# Altium footprint library IC_SMD_QUAD.PcbLib: 112 footprints (part 3 of 7)
Each footprint in its own frame and in the unit in brackets; x right, y up, seen from the top. Pads: shape width x height; smd on the part's side, far side on the other; paste and mask are expansions set on the pad; w line width, h text height; cw(c..) or ccw(c..) is an arc to the next point about the centre after c.
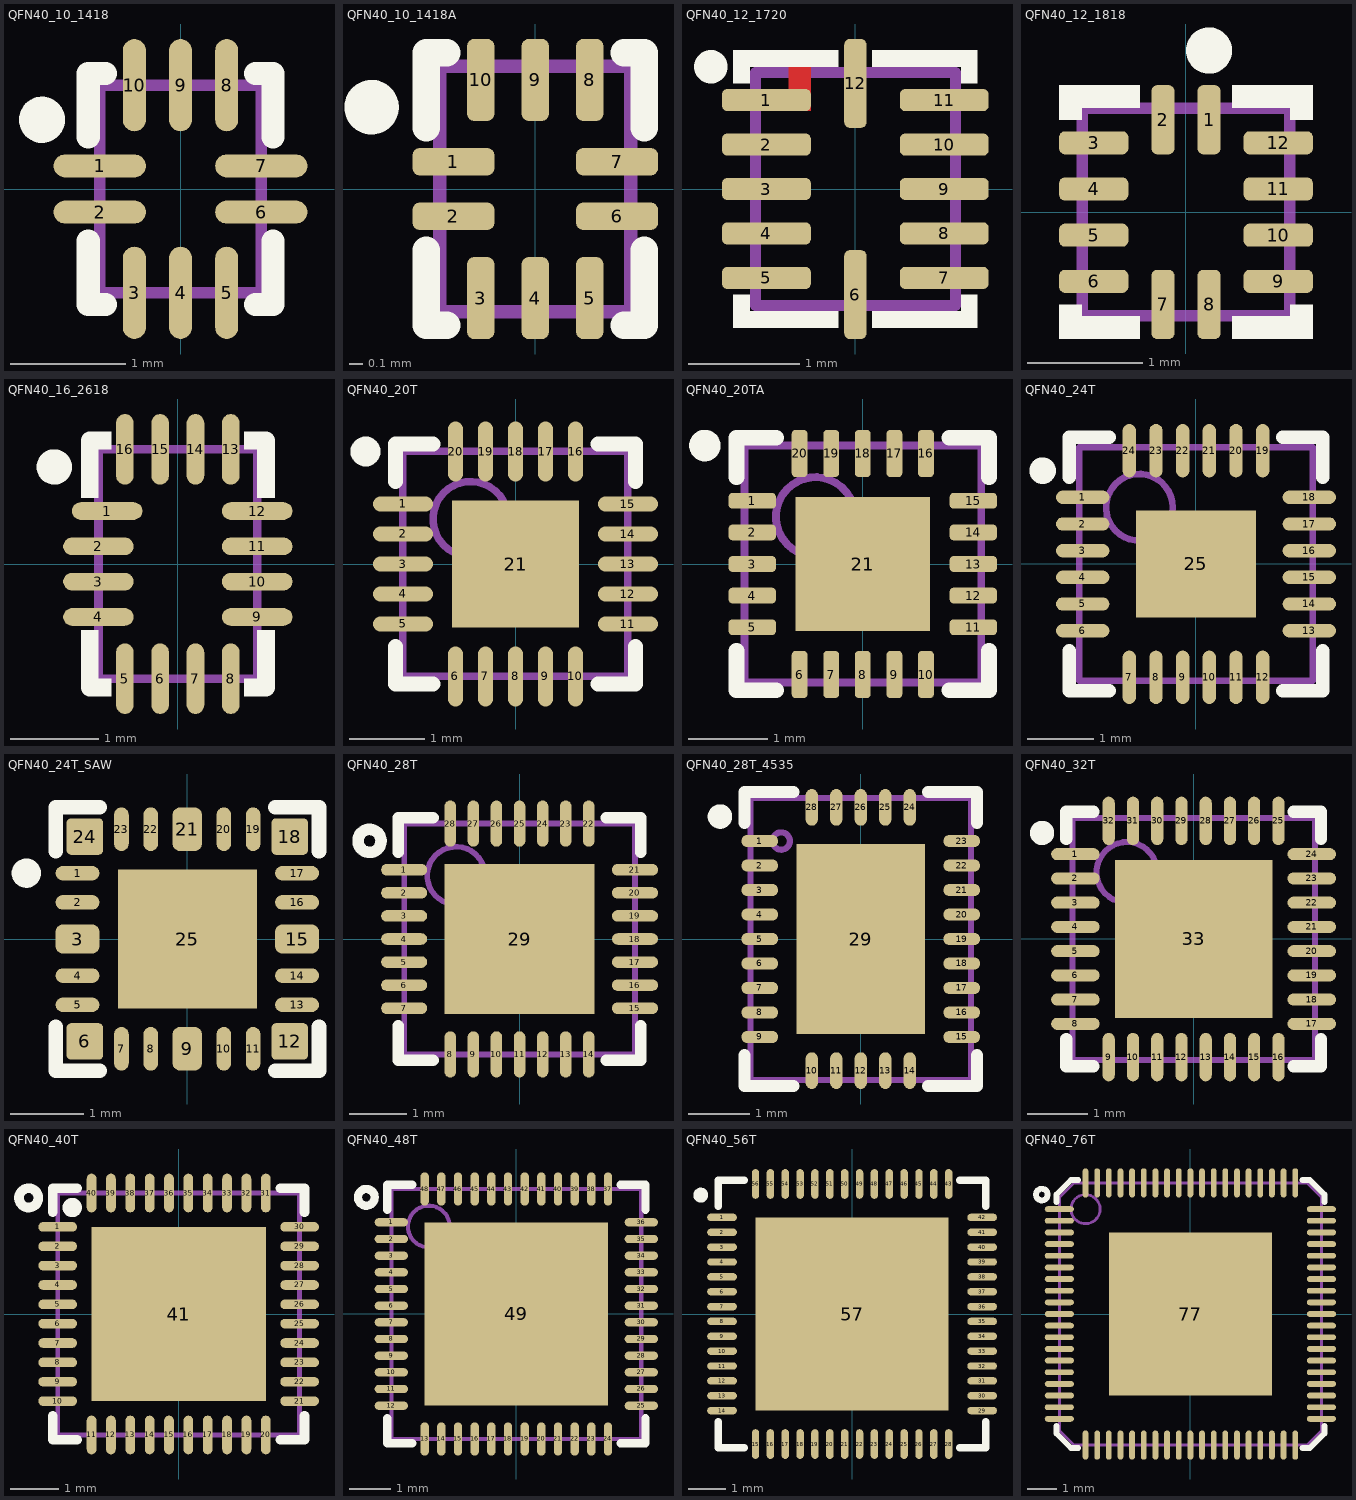
[diagram p2: the footprints below, top view; thin cyan lines are the x and y axes]

## QFN40_10_1418 [mm] "PUQFN-10 RSW 1.8X1.4mm, 0.4mm pitch"
height 0.55
pads (10):
  oval 0.8x0.2 smd mask+0.05: 1(-0.7,0.2) 2(-0.7,-0.2) 6(0.7,-0.2) 7(0.7,0.2)
  oval 0.2x0.8 smd mask+0.05: 3(-0.4,-0.9) 4(0,-0.9) 5(0.4,-0.9) 8(0.4,0.9) 9(0,0.9) 10(-0.4,0.9)
Top Overlay:
  circle w0.2: c-1.2,0.6 r0.1
  lines w0.2: -0.8,-0.45 -0.8,-1 -0.65,-1 ; -0.8,0.45 -0.8,1 -0.65,1 ; 0.65,-1 0.8,-1 0.8,-0.45 ; 0.65,1 0.8,1 0.8,0.45
Top Designator:
  text ".Designator" at -3.835,-0.344 h1.52
Mechanical 13:
  lines w0.1: -0.7,-0.9 0.7,-0.9 0.7,0.9 -0.7,0.9 -0.7,-0.9
3D body "QFN40_10_140X180.step": height 0.55, standoff 0, extent -0.701,-0.901 0.701,0.901

## QFN40_10_1418A [mm] "PUQFN-10 RSW 1.8X1.4mm, 0.4mm pitch"
height 0.55
pads (10):
  rrect50% 0.6x0.2 smd mask+0.05: 1(-0.6,0.2) 2(-0.6,-0.2) 6(0.6,-0.2) 7(0.6,0.2)
  rrect50% 0.2x0.6 smd mask+0.05: 3(-0.4,-0.8) 4(0,-0.8) 5(0.4,-0.8) 8(0.4,0.8) 9(0,0.8) 10(-0.4,0.8)
Top Overlay:
  circle w0.2: c-1.2,0.6 r0.1
  lines w0.2: -0.8,-0.45 -0.8,-1 -0.65,-1 ; -0.8,0.45 -0.8,1 -0.65,1 ; 0.65,-1 0.8,-1 0.8,-0.45 ; 0.65,1 0.8,1 0.8,0.45
Top Designator:
  text ".Designator" at -3.935,-0.344 h1.52
Mechanical 13:
  lines w0.1: -0.7,-0.9 -0.7,0.9 0.7,0.9 0.7,-0.9 -0.7,-0.9
3D body "QFN40_10_140X180.step": height 0.55, standoff 0, extent -0.701,-0.901 0.701,0.901

## QFN40_12_1720 [mm] "UQFN-12, pitch: 0.4mm, 1.7x2x0.5mm"
height 0.55
pads (12):
  rrect50% 0.8x0.2 smd mask+0.05: 1(-0.8,0.8) 2(-0.8,0.4) 3(-0.8,0) 4(-0.8,-0.4) 5(-0.8,-0.8) 7(0.8,-0.8) 8(0.8,-0.4) 9(0.8,0) 10(0.8,0.4) 11(0.8,0.8)
  rrect50% 0.2x0.8 smd mask+0.05: 6(0,-0.95) 12(0,0.95)
Top Layer:
  rectangle: -0.6,0.7 -0.4,1.1
Top Overlay:
  circle w0.2: c-1.3,1.1 r0.05
  rectangle: -1.1,-1.25 -0.15,-1.1
  rectangle: -1.1,-1.25 -0.95,-0.95
  region: 1.1,-0.95 0.95,-0.95 0.95,-1.25 1.1,-1.25
  region: 1.1,-1.1 0.15,-1.1 0.15,-1.25 1.1,-1.25
  region: 1.1,1.25 0.15,1.25 0.15,1.1 1.1,1.1
  region: 1.1,1.25 0.95,1.25 0.95,0.95 1.1,0.95
  rectangle: -1.1,0.95 -0.95,1.25
  rectangle: -1.1,1.1 -0.15,1.25
Top Solder:
  rectangle: -0.65,0.65 -0.35,1.1
Top Designator:
  text ".Designator" at -3.81,-0.344 h1.52
Mechanical 13:
  lines w0.1: -0.9,-1.05 0.9,-1.05 0.9,1.05 -0.9,1.05 -0.9,-1.05
3D body "QFN40_12_170X200.step": height 0.55, standoff 0, extent -0.901,-1.051 0.901,1.051

## QFN40_12_1818 [mm] "UMLP-12, QFN, 12-Leads, 1.8x1.80mm, Pitch 0.40mm, JEDEC MO-252"
height 0.55
pads (12):
  rrect50% 0.2x0.6 smd mask+0.05: 1(0.2,0.8) 2(-0.2,0.8) 7(-0.2,-0.8) 8(0.2,-0.8)
  rrect50% 0.6x0.2 smd mask+0.05: 3(-0.8,0.6) 4(-0.8,0.2) 5(-0.8,-0.2) 6(-0.8,-0.6) 9(0.8,-0.6) 10(0.8,-0.2) 11(0.8,0.2) 12(0.8,0.6)
Top Overlay:
  circle w0.2: c0.2,1.4 r0.1
  rectangle: -1,0.9 -0.4,1.1
  rectangle: -1.1,0.8 -0.9,1.1
  region: 1.1,1.1 0.9,1.1 0.9,0.8 1.1,0.8
  region: 1,1.1 0.4,1.1 0.4,0.9 1,0.9
  region: 1,-0.9 0.4,-0.9 0.4,-1.1 1,-1.1
  region: 1.1,-0.8 0.9,-0.8 0.9,-1.1 1.1,-1.1
  rectangle: -1.1,-1.1 -0.9,-0.8
  rectangle: -1,-1.1 -0.4,-0.9
Top Designator:
  text ".Designator" at -3.71,-0.119 h1.52
Mechanical 13:
  lines w0.1: -0.9,-0.9 -0.9,0.9 0.9,0.9 0.9,-0.9 -0.9,-0.9
3D body "QFN40_12_1818.step": height 0.55, standoff 0, extent -0.91,-0.91 0.91,0.91

## QFN40_16_2618 [mm] "PUQFN-16 RSV 2.6X1.8mm, 0.4mm pitch"
height 0.55
pads (16):
  oval 0.8x0.2 smd mask+0.05: 1(-0.8,0.6) 2(-0.9,0.2) 3(-0.9,-0.2) 4(-0.9,-0.6) 9(0.9,-0.6) 10(0.9,-0.2) 11(0.9,0.2) 12(0.9,0.6)
  oval 0.2x0.8 smd mask+0.05: 5(-0.6,-1.3) 6(-0.2,-1.3) 7(0.2,-1.3) 8(0.6,-1.3) 13(0.6,1.3) 14(0.2,1.3) 15(-0.2,1.3) 16(-0.6,1.3)
Top Overlay:
  circle w0.2: c-1.4,1.1 r0.1
  rectangle: -0.9,-1.5 -0.75,-1.3
  region: -0.9,-0.9 -0.9,-0.75 -1.1,-0.75 -1.1,-0.9
  region: 1.1,-0.9 1.1,-0.75 0.9,-0.75 0.9,-0.9
  region: 0.9,-1.3 0.75,-1.3 0.75,-1.5 0.9,-1.5
  region: 0.9,1.5 0.75,1.5 0.75,1.3 0.9,1.3
  region: 0.9,0.9 0.9,0.75 1.1,0.75 1.1,0.9
  region: -1.1,0.9 -1.1,0.75 -0.9,0.75 -0.9,0.9
  rectangle: -0.9,1.3 -0.75,1.5
  lines w0.2: -1,-0.85 -1,-1.4 -0.9,-1.4 ; -1,0.85 -1,1.4 -0.9,1.4 ; 0.9,-1.4 1,-1.4 1,-0.85 ; 0.9,1.4 1,1.4 1,0.85
Top Designator:
  text ".Designator" at -3.835,-0.344 h1.52
Mechanical 13:
  lines w0.1: -0.9,-1.3 0.9,-1.3 0.9,1.3 -0.9,1.3 -0.9,-1.3
3D body "QFN40_16_260X180.step": height 0.55, standoff 0, extent -0.901,-1.301 0.901,1.301

## QFN40_20T [mm] "QFN, RUK, PWQFN, 20-Leads, Body 3X3mm, Pitch 0.40mm"
height 0.6
pads (21):
  oval 0.8x0.2 smd mask+0.05: 1(-1.5,0.8) 2(-1.5,0.4) 3(-1.5,0) 4(-1.5,-0.4) 5(-1.5,-0.8) 11(1.5,-0.8) 12(1.5,-0.4) 13(1.5,0) 14(1.5,0.4) 15(1.5,0.8)
  oval 0.2x0.8 smd mask+0.05: 6(-0.8,-1.5) 7(-0.4,-1.5) 8(0,-1.5) 9(0.4,-1.5) 10(0.8,-1.5) 16(0.8,1.5) 17(0.4,1.5) 18(0,1.5) 19(-0.4,1.5) 20(-0.8,1.5)
  rect 1.7x1.7 smd paste-3 mask+0.075: 21(0,0)
Top Overlay:
  circle w0.2: c-2,1.5 r0.1
  lines w0.2: -1.6,-1.1 -1.6,-1.6 -1.1,-1.6 ; -1.6,1.1 -1.6,1.6 -1.1,1.6 ; 1.1,-1.6 1.6,-1.6 1.6,-1.1 ; 1.1,1.6 1.6,1.6 1.6,1.1
Top Paste:
  region: -0.8,-0.8 -0.1,-0.8 -0.1,-0.1 -0.8,-0.1
  region: 0.8,-0.8 0.1,-0.8 0.1,-0.1 0.8,-0.1
  region: 0.8,0.8 0.1,0.8 0.1,0.1 0.8,0.1
  region: -0.8,0.8 -0.1,0.8 -0.1,0.1 -0.8,0.1
Top Designator:
  text ".Designator" at -3.835,-0.344 h1.52
Mechanical 13:
  circle w0.1: c-0.6,0.6 r0.5
  lines w0.1: -1.5,-1.5 -1.5,1.5 1.5,1.5 1.5,-1.5 -1.5,-1.5
3D body "QFN40P300X300X60_HS-21N.step": height 0.6, standoff 0, extent -1.51,-1.51 1.51,1.51

## QFN40_20TA [mm] "QFN, RUK, PWQFN, 20-Leads, Body 3X3mm, Pitch 0.40mm"
height 0.6
pads (21):
  rrect50% 0.6x0.2 smd mask+0.05: 1(-1.4,0.8) 2(-1.4,0.4) 3(-1.4,0) 4(-1.4,-0.4) 5(-1.4,-0.8) 11(1.4,-0.8) 12(1.4,-0.4) 13(1.4,0) 14(1.4,0.4) 15(1.4,0.8)
  rrect50% 0.2x0.6 smd mask+0.05: 6(-0.8,-1.4) 7(-0.4,-1.4) 8(0,-1.4) 9(0.4,-1.4) 10(0.8,-1.4) 16(0.8,1.4) 17(0.4,1.4) 18(0,1.4) 19(-0.4,1.4) 20(-0.8,1.4)
  rect 1.7x1.7 smd paste-3 mask+0.075: 21(0,0)
Top Overlay:
  circle w0.2: c-2,1.5 r0.1
  lines w0.2: -1.6,-1.1 -1.6,-1.6 -1.1,-1.6 ; -1.6,1.1 -1.6,1.6 -1.1,1.6 ; 1.1,-1.6 1.6,-1.6 1.6,-1.1 ; 1.1,1.6 1.6,1.6 1.6,1.1
Top Paste:
  region: -0.8,-0.8 -0.1,-0.8 -0.1,-0.1 -0.8,-0.1
  region: 0.8,-0.8 0.1,-0.8 0.1,-0.1 0.8,-0.1
  region: 0.8,0.8 0.1,0.8 0.1,0.1 0.8,0.1
  region: -0.8,0.8 -0.1,0.8 -0.1,0.1 -0.8,0.1
Top Designator:
  text ".Designator" at -3.935,-0.344 h1.52
Mechanical 13:
  circle w0.1: c-0.6,0.6 r0.5
  lines w0.1: -1.5,-1.5 -1.5,1.5 1.5,1.5 1.5,-1.5 -1.5,-1.5
3D body "QFN40P300X300X60_HS-21N.step": height 0.6, standoff 0, extent -1.51,-1.51 1.51,1.51

## QFN40_24T [mm] "QFN, 24-Leads, Body 3.5x3.5mm, Pitch 0.40mm"
height 1
pads (25):
  oval 0.8x0.2 smd mask+0.05: 1(-1.7,1) 2(-1.7,0.6) 3(-1.7,0.2) 4(-1.7,-0.2) 5(-1.7,-0.6) 6(-1.7,-1) 13(1.7,-1) 14(1.7,-0.6) 15(1.7,-0.2) 16(1.7,0.2) 17(1.7,0.6) 18(1.7,1)
  oval 0.2x0.8 smd mask+0.05: 7(-1,-1.7) 8(-0.6,-1.7) 9(-0.2,-1.7) 10(0.2,-1.7) 11(0.6,-1.7) 12(1,-1.7) 19(1,1.7) 20(0.6,1.7) 21(0.2,1.7) 22(-0.2,1.7) 23(-0.6,1.7) 24(-1,1.7)
  rect 1.8x1.6 smd paste-5: 25(0,0)
Top Overlay:
  circle w0.2: c-2.3,1.4 r0.1
  lines w0.2: -1.9,-1.3 -1.9,-1.9 -1.3,-1.9 ; -1.9,1.3 -1.9,1.9 -1.3,1.9 ; 1.3,-1.9 1.9,-1.9 1.9,-1.3 ; 1.3,1.9 1.9,1.9 1.9,1.3
Top Paste:
  region: 0.8,0.7 0.1,0.7 0.1,0.1 0.8,0.1
  region: -0.8,0.7 -0.1,0.7 -0.1,0.1 -0.8,0.1
  region: -0.8,-0.7 -0.1,-0.7 -0.1,-0.1 -0.8,-0.1
  region: 0.8,-0.7 0.1,-0.7 0.1,-0.1 0.8,-0.1
Top Designator:
  text ".Designator" at -3.885,-0.344 h1.52
Mechanical 13:
  circle w0.1: c-0.85,0.85 r0.5
  lines w0.1: -1.75,-1.75 1.75,-1.75 1.75,1.75 -1.75,1.75 -1.75,-1.75
3D body "QFN40_24T.step": height 1, standoff 0, extent -1.76,-1.76 1.76,1.76

## QFN40_24T_SAW [mm] "QFN, 24-Leads, Body 3x3mm, Pitch 0.40mm"
height 0.6
pads (25):
  oval 0.6x0.2 smd mask+0.05: 1(-1.5,0.9) 2(-1.5,0.5) 4(-1.5,-0.5) 5(-1.5,-0.9) 13(1.5,-0.9) 14(1.5,-0.5) 16(1.5,0.5) 17(1.5,0.9)
  rrect50% 0.6x0.4 smd mask+0.05: 3(-1.5,0) 15(1.5,0)
  rrect25% 0.5x0.5 smd mask+0.05: 6(-1.4,-1.4) 12(1.4,-1.4) 18(1.4,1.4) 24(-1.4,1.4)
  oval 0.2x0.6 smd mask+0.05: 7(-0.9,-1.5) 8(-0.5,-1.5) 10(0.5,-1.5) 11(0.9,-1.5) 19(0.9,1.5) 20(0.5,1.5) 22(-0.5,1.5) 23(-0.9,1.5)
  rrect50% 0.4x0.6 smd mask+0.05: 9(0,-1.5) 21(0,1.5)
  rect 1.9x1.9 smd paste-4 mask+0.05: 25(0,0)
Top Overlay:
  circle w0.2: c-2.2,0.9 r0.1
  lines w0.2: -1.8,-1.2 -1.8,-1.8 -1.2,-1.8 ; -1.8,1.2 -1.8,1.8 -1.2,1.8 ; 1.2,-1.8 1.8,-1.8 1.8,-1.2 ; 1.2,1.8 1.8,1.8 1.8,1.2
Top Paste:
  region: -0.8,-0.8 -0.1,-0.8 -0.1,-0.1 -0.8,-0.1
  region: 0.8,-0.8 0.1,-0.8 0.1,-0.1 0.8,-0.1
  region: 0.8,0.8 0.1,0.8 0.1,0.1 0.8,0.1
  region: -0.8,0.8 -0.1,0.8 -0.1,0.1 -0.8,0.1
Top Designator:
  text ".Designator" at -3.96,-0.344 h1.52
3D body: height 0.05, standoff 0, extent -0.95,-0.95 0.95,0.95
3D body: height 0.6, standoff 0.01, extent -1.5,-1.5 1.5,1.5
3D body: height 0.05, standoff 0, extent -1.45,-1.45 -1.15,-1.15
3D body: height 0.05, standoff 0, extent 1.15,-1.45 1.45,-1.15
3D body: height 0.05, standoff 0, extent 1.15,1.15 1.45,1.45
3D body: height 0.05, standoff 0, extent -1.45,1.15 -1.15,1.45
3D body: height 0.05, standoff 0, extent -1.51,-0.2 -1.225,0.2
3D body: height 0.05, standoff 0, extent -1.51,0.8 -1.25,1
3D body: height 0.05, standoff 0, extent -1.51,0.4 -1.25,0.6
3D body: height 0.05, standoff 0, extent -1.51,-1 -1.25,-0.8
3D body: height 0.05, standoff 0, extent -1.51,-0.6 -1.25,-0.4
3D body: height 0.05, standoff 0, extent 0.4,-1.51 0.6,-1.25
3D body: height 0.05, standoff 0, extent 0.8,-1.51 1,-1.25
3D body: height 0.05, standoff 0, extent -0.6,-1.51 -0.4,-1.25
3D body: height 0.05, standoff 0, extent -1,-1.51 -0.8,-1.25
3D body: height 0.05, standoff 0, extent -0.2,-1.51 0.2,-1.225
3D body: height 0.05, standoff 0, extent 1.25,0.4 1.51,0.6
3D body: height 0.05, standoff 0, extent 1.25,0.8 1.51,1
3D body: height 0.05, standoff 0, extent 1.25,-0.6 1.51,-0.4
3D body: height 0.05, standoff 0, extent 1.25,-1 1.51,-0.8
3D body: height 0.05, standoff 0, extent 1.225,-0.2 1.51,0.2
3D body: height 0.05, standoff 0, extent -0.6,1.25 -0.4,1.51
3D body: height 0.05, standoff 0, extent -1,1.25 -0.8,1.51
3D body: height 0.05, standoff 0, extent 0.4,1.25 0.6,1.51
3D body: height 0.05, standoff 0, extent 0.8,1.25 1,1.51
3D body: height 0.05, standoff 0, extent -0.2,1.225 0.2,1.51

## QFN40_28T [mm] "QFN28, 0.4mm pitch, 4x4mm, MLPQ-UT28"
height 0.6
pads (29):
  oval 0.8x0.2 smd mask+0.05: 1(-2,1.2) 2(-2,0.8) 3(-2,0.4) 4(-2,0) 5(-2,-0.4) 6(-2,-0.8) 7(-2,-1.2) 15(2,-1.2) 16(2,-0.8) 17(2,-0.4) 18(2,0) 19(2,0.4) 20(2,0.8) 21(2,1.2)
  oval 0.2x0.8 smd mask+0.05: 8(-1.2,-2) 9(-0.8,-2) 10(-0.4,-2) 11(0,-2) 12(0.4,-2) 13(0.8,-2) 14(1.2,-2) 22(1.2,2) 23(0.8,2) 24(0.4,2) 25(0,2) 26(-0.4,2) 27(-0.8,2) 28(-1.2,2)
  rect 2.6x2.6 smd paste-5 mask+0.05: 29(0,0)
Top Overlay:
  circle w0.2: c-2.6,1.7 r0.2
  lines w0.2: -2.1,-1.5 -2.1,-2.1 -1.5,-2.1 ; -2.1,1.5 -2.1,2.1 -1.5,2.1 ; 1.5,-2.1 2.1,-2.1 2.1,-1.5 ; 1.5,2.1 2.1,2.1 2.1,1.5
Top Paste:
  rectangle: -1.2,-1.2 -0.2,-0.2
  region: 1.2,-0.2 0.2,-0.2 0.2,-1.2 1.2,-1.2
  region: 1.2,1.2 0.2,1.2 0.2,0.2 1.2,0.2
  rectangle: -1.2,0.2 -0.2,1.2
Top Designator:
  text ".Designator" at -3.935,-0.344 h1.52
Mechanical 13:
  circle w0.1: c-1.1,1.1 r0.5
  lines w0.1: -2,-2 -2,2 2,2 2,-2 -2,-2
3D body "QFN40_28T.step": height 0.6, standoff 0, extent -2.001,-2.001 2.001,2.001

## QFN40_28T_4535 [mm] "VQFN-CLIP 28, RVE, 4.5x3.5x1, 0.4mm pitch"
height 1
pads (29):
  oval 0.6x0.2 smd paste+0 mask+0.05: 1(-1.65,1.6) 2(-1.65,1.2) 3(-1.65,0.8) 4(-1.65,0.4) 5(-1.65,0) 6(-1.65,-0.4) 7(-1.65,-0.8) 8(-1.65,-1.2) 9(-1.65,-1.6) 15(1.65,-1.6) 16(1.65,-1.2) 17(1.65,-0.8) 18(1.65,-0.4) 19(1.65,0) 20(1.65,0.4) 21(1.65,0.8) 22(1.65,1.2) 23(1.65,1.6)
  oval 0.2x0.6 smd paste+0 mask+0.05: 10(-0.8,-2.15) 11(-0.4,-2.15) 12(0,-2.15) 13(0.4,-2.15) 14(0.8,-2.15) 24(0.8,2.15) 25(0.4,2.15) 26(0,2.15) 27(-0.4,2.15) 28(-0.8,2.15)
  rect 2.1x3.1 smd paste-1.537 mask+0.051: 29(0,0)
Top Overlay:
  circle w0.2: c-2.3,2 r0.1
  lines w0.2: -1.9,-1.9 -1.9,-2.4 -1.1,-2.4 ; -1.9,1.9 -1.9,2.4 -1.1,2.4 ; 1.1,-2.4 1.9,-2.4 1.9,-1.9 ; 1.1,2.4 1.9,2.4 1.9,1.9
Top Paste:
  region: -0.1,0.1 -0.1,1.45 -1,1.45 -1,0.1
  region: -0.1,-1.45 -0.1,-0.1 -1,-0.1 -1,-1.45
  region: 0.1,-1.45 0.1,-0.1 1,-0.1 1,-1.45
  region: 0.1,0.1 0.1,1.45 1,1.45 1,0.1
Top Designator:
  text ".Designator" at -3.96,-0.344 h1.52
Mechanical 13:
  circle w0.1: c-1.3,1.6 r0.141
  lines w0.1: -1.8,-2.3 -1.8,2.3 1.8,2.3 1.8,-2.3 -1.8,-2.3
3D body "RVE0028A.stp": height 1, standoff 0, extent -1.75,-2.25 1.75,2.25
3D body: height 0.25, standoff 0, extent 0,0 0.254,0.254

## QFN40_32T [mm] "QFN, 32M3, 32-Leads, Body 4x4mm, Pitch 0.40mm"
height 0.9
pads (33):
  oval 0.8x0.2 smd mask+0.05: 1(-1.95,1.4) 2(-1.95,1) 3(-1.95,0.6) 4(-1.95,0.2) 5(-1.95,-0.2) 6(-1.95,-0.6) 7(-1.95,-1) 8(-1.95,-1.4) 17(1.95,-1.4) 18(1.95,-1) 19(1.95,-0.6) 20(1.95,-0.2) 21(1.95,0.2) 22(1.95,0.6) 23(1.95,1) 24(1.95,1.4)
  oval 0.2x0.8 smd mask+0.05: 9(-1.4,-1.95) 10(-1,-1.95) 11(-0.6,-1.95) 12(-0.2,-1.95) 13(0.2,-1.95) 14(0.6,-1.95) 15(1,-1.95) 16(1.4,-1.95) 25(1.4,1.95) 26(1,1.95) 27(0.6,1.95) 28(0.2,1.95) 29(-0.2,1.95) 30(-0.6,1.95) 31(-1,1.95) 32(-1.4,1.95)
  rect 2.6x2.6 smd paste-5 mask+0.1: 33(0,0)
Top Overlay:
  circle w0.2: c-2.5,1.75 r0.1
  lines w0.2: -2.1,-1.65 -2.1,-2.1 -1.65,-2.1 ; -2.1,1.65 -2.1,2.1 -1.65,2.1 ; 1.65,-2.1 2.1,-2.1 2.1,-1.65 ; 1.65,2.1 2.1,2.1 2.1,1.65
Top Paste:
  rectangle: -1.2,-1.2 -0.2,-0.2
  region: 1.2,-0.2 0.2,-0.2 0.2,-1.2 1.2,-1.2
  region: 1.2,1.2 0.2,1.2 0.2,0.2 1.2,0.2
  rectangle: -1.2,0.2 -0.2,1.2
Top Designator:
  text ".Designator" at -3.86,-0.344 h1.52
Mechanical 13:
  circle w0.1: c-1.1,1.1 r0.5
  lines w0.1: -2,-2 -2,2 2,2 2,-2 -2,-2
3D body "QFN40_32T.step": height 0.9, standoff 0, extent -2.001,-2.001 2.001,2.001

## QFN40_40T [mm] "40 TQFN-EP (maxim), 5X5mm, 0.4mm"
height 0.75
pads (41):
  oval 0.8x0.2 smd mask+0.05: 1(-2.5,1.8) 2(-2.5,1.4) 3(-2.5,1) 4(-2.5,0.6) 5(-2.5,0.2) 6(-2.5,-0.2) 7(-2.5,-0.6) 8(-2.5,-1) 9(-2.5,-1.4) 10(-2.5,-1.8) 21(2.5,-1.8) 22(2.5,-1.4) 23(2.5,-1) 24(2.5,-0.6) 25(2.5,-0.2) 26(2.5,0.2) 27(2.5,0.6) 28(2.5,1) 29(2.5,1.4) 30(2.5,1.8)
  oval 0.2x0.8 smd mask+0.05: 11(-1.8,-2.5) 12(-1.4,-2.5) 13(-1,-2.5) 14(-0.6,-2.5) 15(-0.2,-2.5) 16(0.2,-2.5) 17(0.6,-2.5) 18(1,-2.5) 19(1.4,-2.5) 20(1.8,-2.5) 31(1.8,2.5) 32(1.4,2.5) 33(1,2.5) 34(0.6,2.5) 35(0.2,2.5) 36(-0.2,2.5) 37(-0.6,2.5) 38(-1,2.5) 39(-1.4,2.5) 40(-1.8,2.5)
  rect 3.6x3.6 smd paste-5: 41(0,0)
Top Overlay:
  circle w0.2: c-2.2,2.2 r0.1
  circle w0.2: c-3.1,2.4 r0.2
  lines w0.2: -2.6,-2.1 -2.6,-2.6 -2.1,-2.6 ; -2.6,2.1 -2.6,2.6 -2.1,2.6 ; 2.1,-2.6 2.6,-2.6 2.6,-2.1 ; 2.1,2.6 2.6,2.6 2.6,2.1
Top Paste:
  rectangle: -1.6,-1.6 -0.2,-0.2
  region: 1.6,-0.2 0.2,-0.2 0.2,-1.6 1.6,-1.6
  region: 1.6,1.6 0.2,1.6 0.2,0.2 1.6,0.2
  rectangle: -1.6,0.2 -0.2,1.6
Top Designator:
  text ".Designator" at -3.935,-0.344 h1.52
Mechanical 13:
  lines w0.1: -2.5,-2.5 -2.5,2.5 2.5,2.5 2.5,-2.5 -2.5,-2.5
3D body "User Library-QFN 40 5x5.step": height 0.73, standoff -0.02, extent -2.501,-2.501 2.501,2.501

## QFN40_48T [mm] "QFN, 48-Leads, Body 6.00x6.00mm, Pitch 0.40mm, Thermal Pad 4.40x4.40mm"
height 1
pads (49):
  oval 0.8x0.2 smd mask+0.05: 1(-3,2.2) 2(-3,1.8) 3(-3,1.4) 4(-3,1) 5(-3,0.6) 6(-3,0.2) 7(-3,-0.2) 8(-3,-0.6) 9(-3,-1) 10(-3,-1.4) 11(-3,-1.8) 12(-3,-2.2) 25(3,-2.2) 26(3,-1.8) 27(3,-1.4) 28(3,-1) 29(3,-0.6) 30(3,-0.2) 31(3,0.2) 32(3,0.6) 33(3,1) 34(3,1.4) 35(3,1.8) 36(3,2.2)
  oval 0.2x0.8 smd mask+0.05: 13(-2.2,-3) 14(-1.8,-3) 15(-1.4,-3) 16(-1,-3) 17(-0.6,-3) 18(-0.2,-3) 19(0.2,-3) 20(0.6,-3) 21(1,-3) 22(1.4,-3) 23(1.8,-3) 24(2.2,-3) 37(2.2,3) 38(1.8,3) 39(1.4,3) 40(1,3) 41(0.6,3) 42(0.2,3) 43(-0.2,3) 44(-0.6,3) 45(-1,3) 46(-1.4,3) 47(-1.8,3) 48(-2.2,3)
  rect 4.4x4.4 smd paste-5 mask+0.1: 49(0,0)
Top Overlay:
  circle w0.2: c-3.6,2.8 r0.2
  lines w0.2: -3.1,-2.5 -3.1,-3.1 -2.5,-3.1 ; -3.1,2.5 -3.1,3.1 -2.5,3.1 ; 2.5,-3.1 3.1,-3.1 3.1,-2.5 ; 2.5,3.1 3.1,3.1 3.1,2.5
Top Paste:
  rectangle: -2,-2 -0.2,-0.2
  region: 2,-0.2 0.2,-0.2 0.2,-2 2,-2
  region: 2,2 0.2,2 0.2,0.2 2,0.2
  rectangle: -2,0.2 -0.2,2
Top Designator:
  text ".Designator" at -3.935,-0.344 h1.52
Mechanical 13:
  circle w0.1: c-2.1,2.1 r0.5
  lines w0.1: -3,-3 3,-3 3,3 -3,3 -3,-3
3D body: height 1, standoff 0, extent -3,-3 3,3

## QFN40_56T [mm] "QFN-56 7*7,  pitch: 0.4mm, 7x7x0.8mm"
height 0.8
pads (57):
  oval 0.8x0.2 smd mask+0.05: 1(-3.5,2.6) 2(-3.5,2.2) 3(-3.5,1.8) 4(-3.5,1.4) 5(-3.5,1) 6(-3.5,0.6) 7(-3.5,0.2) 8(-3.5,-0.2) 9(-3.5,-0.6) 10(-3.5,-1) 11(-3.5,-1.4) 12(-3.5,-1.8) 13(-3.5,-2.2) 14(-3.5,-2.6) 29(3.5,-2.6) 30(3.5,-2.2) 31(3.5,-1.8) 32(3.5,-1.4) 33(3.5,-1) 34(3.5,-0.6) 35(3.5,-0.2) 36(3.5,0.2) 37(3.5,0.6) 38(3.5,1) 39(3.5,1.4) 40(3.5,1.8) 41(3.5,2.2) 42(3.5,2.6)
  oval 0.2x0.8 smd mask+0.05: 15(-2.6,-3.5) 16(-2.2,-3.5) 17(-1.8,-3.5) 18(-1.4,-3.5) 19(-1,-3.5) 20(-0.6,-3.5) 21(-0.2,-3.5) 22(0.2,-3.5) 23(0.6,-3.5) 24(1,-3.5) 25(1.4,-3.5) 26(1.8,-3.5) 27(2.2,-3.5) 28(2.6,-3.5) 43(2.6,3.5) 44(2.2,3.5) 45(1.8,3.5) 46(1.4,3.5) 47(1,3.5) 48(0.6,3.5) 49(0.2,3.5) 50(-0.2,3.5) 51(-0.6,3.5) 52(-1,3.5) 53(-1.4,3.5) 54(-1.8,3.5) 55(-2.2,3.5) 56(-2.6,3.5)
  rect 5.2x5.2 smd paste-3 mask+0.075: 57(0,0)
Top Overlay:
  circle w0.2: c-4.075,3.2 r0.1
  lines w0.2: -3.6,-2.9 -3.6,-3.6 -2.9,-3.6 ; -3.6,2.9 -3.6,3.6 -2.9,3.6 ; 2.9,-3.6 3.6,-3.6 3.6,-2.9 ; 2.9,3.6 3.6,3.6 3.6,2.9
Top Paste:
  rectangle: -1.2,0.2 -0.2,1.2
  rectangle: -2.4,1.4 -1.4,2.4
  region: -0.2,2.4 -1.2,2.4 -1.2,1.4 -0.2,1.4
  rectangle: -2.4,0.2 -1.4,1.2
  region: 2.4,1.2 1.4,1.2 1.4,0.2 2.4,0.2
  rectangle: 0.2,1.4 1.2,2.4
  region: 2.4,2.4 1.4,2.4 1.4,1.4 2.4,1.4
  region: 1.2,1.2 0.2,1.2 0.2,0.2 1.2,0.2
  region: 1.2,-0.2 0.2,-0.2 0.2,-1.2 1.2,-1.2
  region: 2.4,-1.4 1.4,-1.4 1.4,-2.4 2.4,-2.4
  rectangle: 0.2,-2.4 1.2,-1.4
  region: 2.4,-0.2 1.4,-0.2 1.4,-1.2 2.4,-1.2
  rectangle: -2.4,-1.2 -1.4,-0.2
  region: -0.2,-1.4 -1.2,-1.4 -1.2,-2.4 -0.2,-2.4
  rectangle: -2.4,-2.4 -1.4,-1.4
  rectangle: -1.2,-1.2 -0.2,-0.2
Top Designator:
  text ".Designator" at -3.873,-0.344 h1.52
3D body "AXP805.stp": height 0.8, standoff 0, extent -3.55,-3.55 3.55,3.55

## QFN40_76T [mm] "QFN, 76-Leads, Body 9.00x9.00mm, Pitch 0.40mm, Thermal Pad 5.50x5.50mm"
height 1
pads (77):
  oval 1x0.2 smd mask+0.05: 1(-4.5,3.6) 2(-4.5,3.2) 3(-4.5,2.8) 4(-4.5,2.4) 5(-4.5,2) 6(-4.5,1.6) 7(-4.5,1.2) 8(-4.5,0.8) 9(-4.5,0.4) 10(-4.5,0) 11(-4.5,-0.4) 12(-4.5,-0.8) 13(-4.5,-1.2) 14(-4.5,-1.6) 15(-4.5,-2) 16(-4.5,-2.4) 17(-4.5,-2.8) 18(-4.5,-3.2) 19(-4.5,-3.6) 39(4.5,-3.6) 40(4.5,-3.2) 41(4.5,-2.8) 42(4.5,-2.4) 43(4.5,-2) 44(4.5,-1.6) 45(4.5,-1.2) 46(4.5,-0.8) 47(4.5,-0.4) 48(4.5,0) 49(4.5,0.4) 50(4.5,0.8) 51(4.5,1.2) 52(4.5,1.6) 53(4.5,2) 54(4.5,2.4) 55(4.5,2.8) 56(4.5,3.2) 57(4.5,3.6)
  oval 0.2x1 smd mask+0.05: 20(-3.6,-4.5) 21(-3.2,-4.5) 22(-2.8,-4.5) 23(-2.4,-4.5) 24(-2,-4.5) 25(-1.6,-4.5) 26(-1.2,-4.5) 27(-0.8,-4.5) 28(-0.4,-4.5) 29(0,-4.5) 30(0.4,-4.5) 31(0.8,-4.5) 32(1.2,-4.5) 33(1.6,-4.5) 34(2,-4.5) 35(2.4,-4.5) 36(2.8,-4.5) 37(3.2,-4.5) 38(3.6,-4.5) 58(3.6,4.5) 59(3.2,4.5) 60(2.8,4.5) 61(2.4,4.5) 62(2,4.5) 63(1.6,4.5) 64(1.2,4.5) 65(0.8,4.5) 66(0.4,4.5) 67(0,4.5) 68(-0.4,4.5) 69(-0.8,4.5) 70(-1.2,4.5) 71(-1.6,4.5) 72(-2,4.5) 73(-2.4,4.5) 74(-2.8,4.5) 75(-3.2,4.5) 76(-3.6,4.5)
  rect 5.6x5.6 smd paste-5: 77(0,0)
Top Overlay:
  circle w0.2: c-5.1,4.1 r0.2
  lines w0.2: -4.6,-3.85 -4.6,-4.1 -4.1,-4.6 -3.85,-4.6 ; -4.6,3.85 -4.6,4.1 -4.1,4.6 -3.85,4.6 ; 3.85,-4.6 4.1,-4.6 4.6,-4.1 4.6,-3.85 ; 3.85,4.6 4.1,4.6 4.6,4.1 4.6,3.85
Top Paste:
  region: 1.2,-0.2 0.2,-0.2 0.2,-1.2 1.2,-1.2
  region: 2.6,-1.6 1.6,-1.6 1.6,-2.6 2.6,-2.6
  rectangle: 0.2,-2.6 1.2,-1.6
  region: 2.6,-0.2 1.6,-0.2 1.6,-1.2 2.6,-1.2
  rectangle: -2.6,-1.2 -1.6,-0.2
  region: -0.2,-1.6 -1.2,-1.6 -1.2,-2.6 -0.2,-2.6
  rectangle: -2.6,-2.6 -1.6,-1.6
  rectangle: -1.2,-1.2 -0.2,-0.2
  rectangle: -1.2,0.2 -0.2,1.2
  rectangle: -2.6,1.6 -1.6,2.6
  region: -0.2,2.6 -1.2,2.6 -1.2,1.6 -0.2,1.6
  rectangle: -2.6,0.2 -1.6,1.2
  region: 2.6,1.2 1.6,1.2 1.6,0.2 2.6,0.2
  rectangle: 0.2,1.6 1.2,2.6
  region: 2.6,2.6 1.6,2.6 1.6,1.6 2.6,1.6
  region: 1.2,1.2 0.2,1.2 0.2,0.2 1.2,0.2
Top Designator:
  text ".Designator" at -3.885,-0.344 h1.52
Mechanical 13:
  circle w0.1: c-3.6,3.6 r0.5
  lines w0.1: -4.5,-4 -4.5,4 -4,4.5 4,4.5 4.5,4 4.5,-4 4,-4.5 -4,-4.5 -4.5,-4
3D body: height 1, standoff 0, extent -4.5,-4.5 4.5,4.5